# Altium schematic symbol library TitansLib.SchLib: 462 symbols (part 14 of 24)
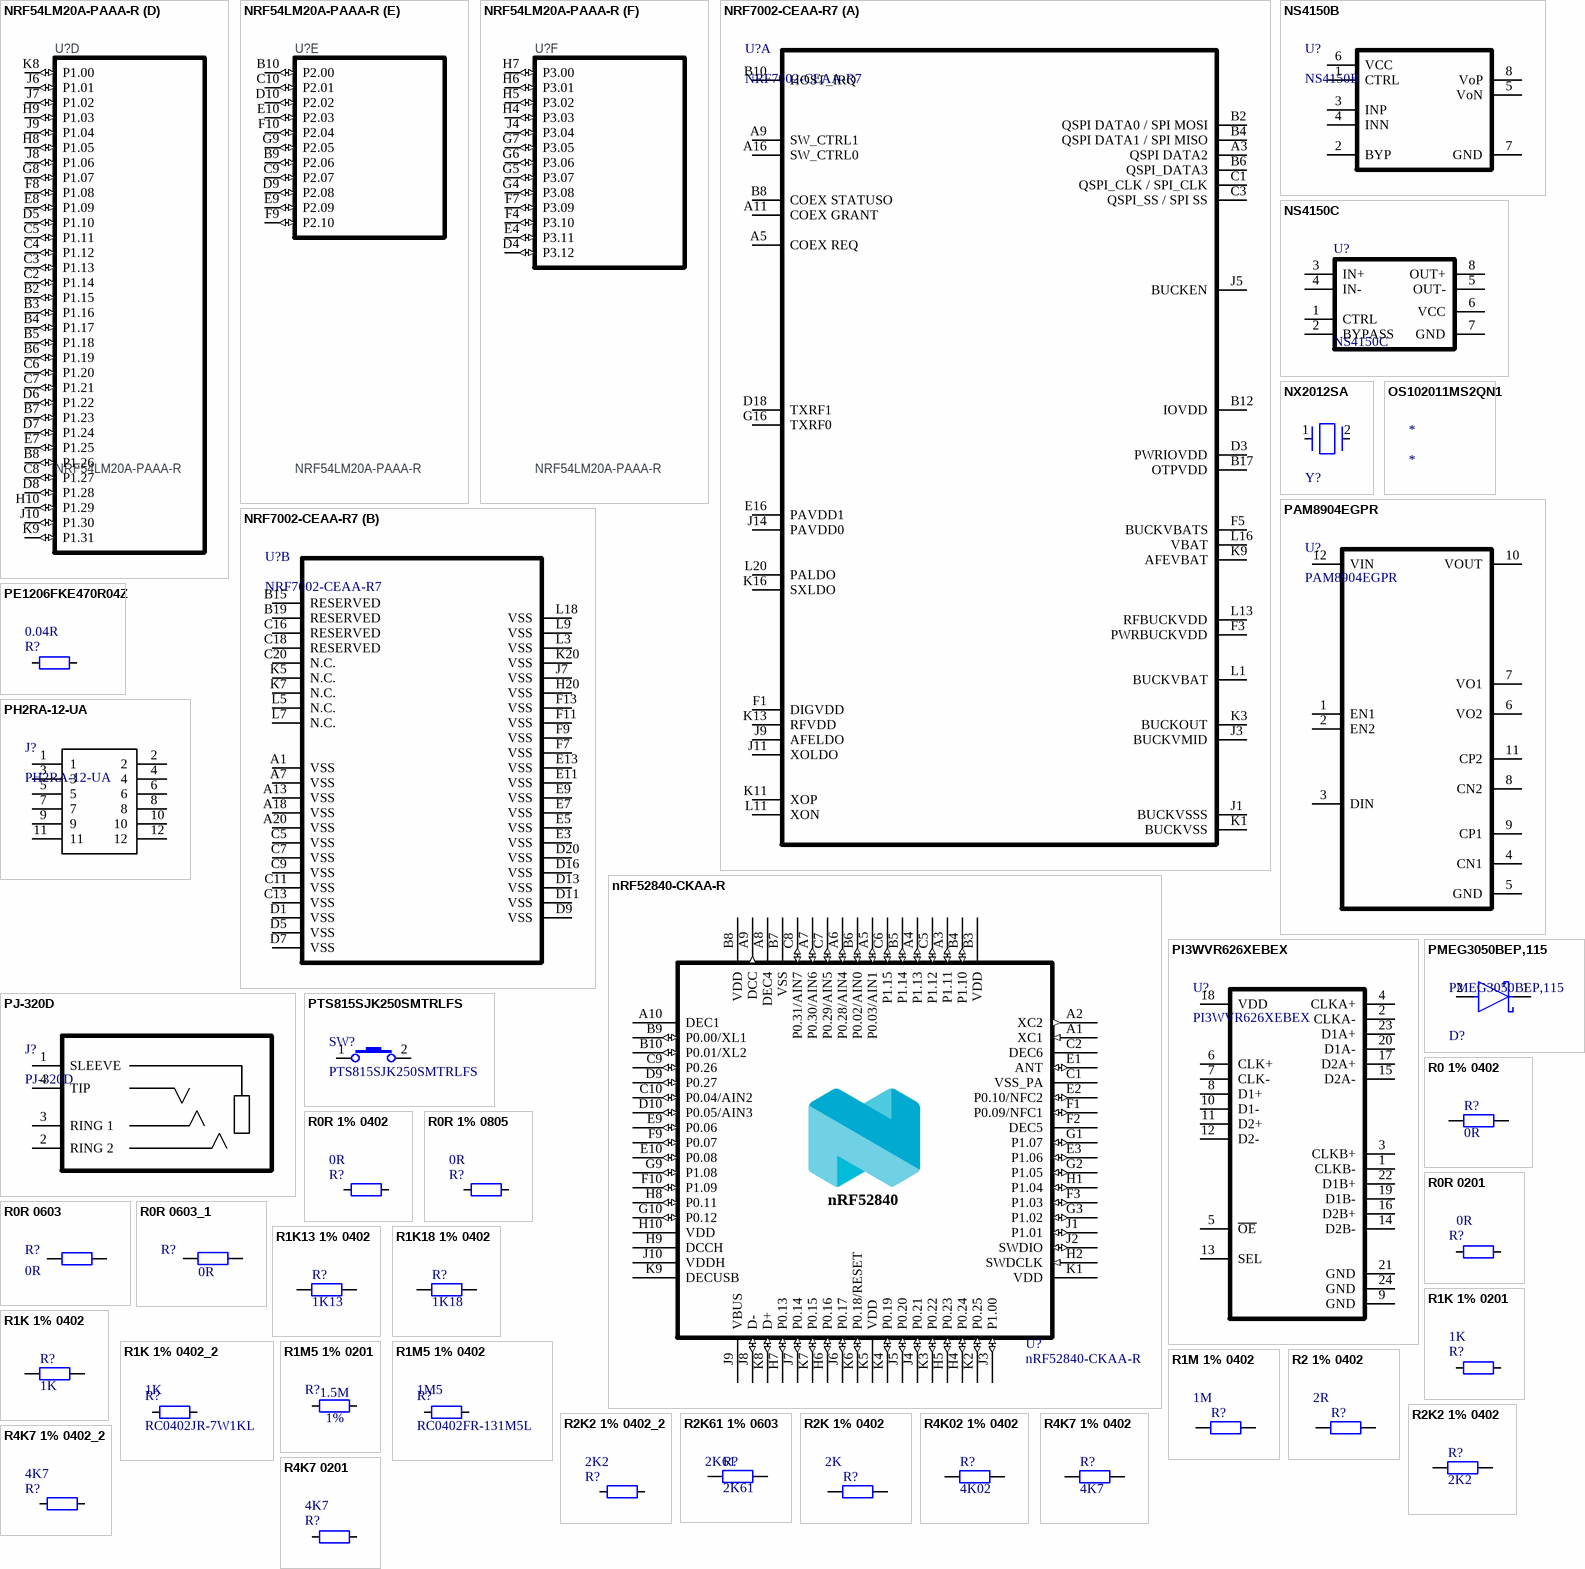
[diagram p30: symbols NRF54LM20A-PAAA-R to R4K7 0201]

## PH2RA-12-UA
designator J?
Connector; Manufacturer_Name: Adam Tech; Datasheet Link: https://app.adam-tech.com/products/download/data_sheet/200508/ph2ra-xx-ua-data-sheet.pdf; Height: 5.3848mm; Manufacturer Part Number: PH2RA-12-UA; Mouser Part Number: 737-PH2RA-12-UA; Mouser Price/Stock: https://www.mouser.co.uk/ProductDetail/Adam-Tech/PH2RA-12-UA?qs=HoCaDK9Nz5deHcBV3KpFqA%3D%3D; Arrow Part Number: PH2RA-12-UA; Arrow Price/Stock: https://www.arrow.com/en/products/ph2ra-12-ua/adam-tech?region=nac; Supplier 1: DigiKey; Supplier Part Number 1: 2057-PH2RA-12-UA-ND; Supplier 2: Mouser; Supplier Part Number 2: 737-PH2RA-12-UA
footprint PH2RA12UA
pins: 1, 2, 3, 4, 5, 6, 7, 8, 9, 10, 11, 12

## PI3WVR626XEBEX
designator U?
Two-data-lane MIPI switch.; Manufacturer: Diodes; Supplier: Future Electronics; Supplier Part Number: 9202612; Manufacturer Part Number: PI3WVR626XEBEX; RoHS: No; Category: Integrated Circuits (ICs); Stock: 3000; Pricing: 1=0.895, 15=0.795, 100=0.725, 400=0.675, 2000=0.615 (USD); RoHS Compliant: Yes; Supplier 1: Digikey; Supplier Part Number 1: 31-PI3WVR626XEBEXDKR-ND; Supplier 2: Mouser; Supplier Part Number 2: 621-PI3WVR626XEBEX
pins: 1 CLKB-, 2 CLKA-, 3 CLKB+, 4 CLKA+, 5 ~{OE}, 6 CLK+, 7 CLK-, 8 D1+, 9 GND, 10 D1-, 11 D2+, 12 D2-, 13 SEL, 14 D2B-, 15 D2A-, 16 D2B+, 17 D2A+, 18 VDD, 19 D1B-, 20 D1A-, 21 GND, 22 D1B+, 23 D1A+, 24 GND

## PJ-320D
designator J?
3.5mm Headphone Jack 500mA 30V Surface Mount; Manufacturer 1: HanElectricity; Datasheet Link: https://www.lcsc.com/datasheet/C22459515.pdf?spm=wm.sxq.inf.ggs___wm.fly.bg.0.xh&lcsc_vid=TwJcA1RTQVcIX1UDQQNYAlNXT1FbVQIAQ1cKAlUFFFkxVlNeQ1RWU1NWR1NZXjsOAxUeFF5JWBYZEEoKFBINSQcJGk4%3D; Height: 5.75mm; Manufacturer Part Number 1: PJ-320D; Supplier 1: LCSC; Supplier Part Number 1: C22459515; Supplier Unit Price 1: 0.029
footprint PJ320D_HANS_Smaller pads
pins: 1 SLEEVE, 2 RING 2, 3 RING 1, 4 TIP

## PMEG3050BEP,115
designator D?
Rectifier Diode Schottky 30V 5A Automotive 2-Pin SOD-128 T/R / DIODE SCHOTTKY 30V 5A SOD128; Manufacturer: Nexperia; Manufacturer Lifecycle Status: RELEASED FOR SUPPLY; Value: 800pF; Element Configuration: Single; Forward Voltage: 450mV; Max Forward Surge Current (Ifsm): 70A; Max Junction Temperature (Tj): 150°C; Max Power Dissipation: 625mW; Max Reverse Leakage Current: 250µA; Number of Elements: 1; RoHS Compliant: Yes; Supplier: Newark; Supplier Part Number: PMEG3050BEP,115; Manufacturer Part Number: PMEG3050BEP,115; RoHS: Compliant; Category: Schottky Diodes; Stock: 19889; Pricing: 5=1,4, 10=0,876, 25=0,772, 50=0,669, 100=0,566, 250=0,499, 500=0,432, 1000=0,389 (USD); Ambient Temperature Range High: 150°C; Average Rectified Current: 5A; China RoHS: Non-Compliant; Contact Plating: Tin; Forward Current: 5A; Height: 1.1mm; Lead Free: Lead Free; Lifecycle Status: Production; Max Operating Temperature: 150°C; Max Output current: 5A; Max Repetitive Reverse Voltage (Vrrm): 30V; Max Reverse Voltage (DC): 30V; Max Surge Current: 70A; Min Operating Temperature: -55°C; Mounting Technology: Surface Mount; Pins: 2; Number of Terminals: 2; Peak Non-Repetitive Surge Current: 70A; Peak Reverse Current: 250µA; Radiation Hardening: No; Ratings: AEC-Q101; REACH SVHC: No; Reverse Standoff Voltage: 30V; Reverse Voltage: 30V; Schedule B: 8541100050, 8541100050|8541100050|8541100050|8541100050|8541100050, 8541100080; ComponentLink1URL: https://datasheet.octopart.com:443/PMEG3050BEP%2C115-Nexperia-datasheet-87581997.pdf?src-supplier=Upverter; ComponentLink1Description: https://datasheet.octopart.com:443/PMEG3050BEP%2C115-Nexperia-datasheet-87581997.pdf?src-supplier=Upverter; ComponentLink2URL: https://datasheet.octopart.com:443/PMEG3050BEP%2C115-Nexperia-datasheet-8823949.pdf?src-supplier=element14+APAC; ComponentLink2Description: https://datasheet.octopart.com:443/PMEG3050BEP%2C115-Nexperia-datasheet-8823949.pdf?src-supplier=element14+APAC; ComponentLink3URL: https://datasheet.octopart.com:443/PMEG3050BEP%2C115-Nexperia-datasheet-180924785.pdf?src-supplier=Farnell; ComponentLink3Description: https://datasheet.octopart.com:443/PMEG3050BEP%2C115-Nexperia-datasheet-180924785.pdf?src-supplier=Farnell; ComponentLink4URL: https://datasheet.octopart.com:443/PMEG3050BEP%2C115-Nexperia-datasheet-177198915.pdf?src-supplier=Burklin+Elektronik; ComponentLink4Description: https://datasheet.octopart.com:443/PMEG3050BEP%2C115-Nexperia-datasheet-177198915.pdf?src-supplier=Burklin+Elektronik; ComponentLink5URL: https://datasheet.octopart.com:443/PMEG3050BEP%2C115-Nexperia-datasheet-182428595.pdf?src-supplier=Newark; ComponentLink5Description: https://datasheet.octopart.com:443/PMEG3050BEP%2C115-Nexperia-datasheet-182428595.pdf?src-supplier=Newark; ComponentLink6URL: https://datasheet.octopart.com:443/PMEG3050BEP%2C115-Nexperia-datasheet-103775416.pdf?src-supplier=TME; ComponentLink6Description: https://datasheet.octopart.com:443/PMEG3050BEP%2C115-Nexperia-datasheet-103775416.pdf?src-supplier=TME; ComponentLink7URL: http://sigma.octopart.com:80/reach_statement/NXP-Semiconductors-company-13.pdf?src-supplier=Compliance+Statements; ComponentLink7Description: http://sigma.octopart.com:80/reach_statement/NXP-Semiconductors-company-13.pdf?src-supplier=Compliance+Statements; ComponentLink8URL: http://sigma.octopart.com:80/rohs_statement/NXP-Semiconductors-company-12.pdf?src-supplier=Compliance+Statements; ComponentLink8Description: http://sigma.octopart.com:80/rohs_statement/NXP-Semiconductors-company-12.pdf?src-supplier=Compliance+Statements; Supplier 1: DigiKey; Supplier Part Number 1: 1727-5207-1-ND; Supplier 2: DigiKey; Supplier Part Number 2: 1727-5207-6-ND; Supplier 3: Mouser; Supplier Part Number 3: 771-PMEG3050BEP-115; Supplier 4: LCSC; Supplier Part Number 4: C456148
footprint FP-SOD128-MFG
pins: 1 C, 2 A

## PTS815SJK250SMTRLFS
designator SW?
Keypad Switch, 1 Switches, SPST, Momentary-tactile, 0.05A, 12VDC, 2.94N, Solder Terminal, Surface Mount-straight; Manufacturer: ITT C&K; Supplier: Digikey; Supplier Part Number: CKN12216-1-ND; Manufacturer Part Number: PTS815SJK250SMTRLFS; RoHS: Yes; Category: Tactile Switches; Stock: 10292; Pricing: 1=0.22, 10=0.191, 25=0.1788, 100=0.1606, 250=0.14892, 500=0.14052, 1000=0.13263 (USD); ComponentLink1URL: http://datasheet.octopart.com/PTS815SJK250SMTRLFS-C%26K-Components-datasheet-130077068.pdf?src-supplier=Avnet; ComponentLink1Description: http://datasheet.octopart.com/PTS815SJK250SMTRLFS-C%26K-Components-datasheet-130077068.pdf?src-supplier=Avnet; ComponentLink2URL: http://datasheet.octopart.com/PTS815SJK250SMTRLFS-C%26K-Components-datasheet-130077068.pdf?src-supplier=Digikey; ComponentLink2Description: http://datasheet.octopart.com/PTS815SJK250SMTRLFS-C%26K-Components-datasheet-130077068.pdf?src-supplier=Digikey; ComponentLink3URL: http://datasheet.octopart.com/PTS815SJK250SMTRLFS-C%26K-Components-datasheet-130077068.pdf?src-supplier=Allied+Electronics; ComponentLink3Description: http://datasheet.octopart.com/PTS815SJK250SMTRLFS-C%26K-Components-datasheet-130077068.pdf?src-supplier=Allied+Electronics; ComponentLink4URL: http://datasheet.octopart.com/PTS815SJK250SMTRLFS-C%26K-Components-datasheet-130077068.pdf?src-supplier=Newark; ComponentLink4Description: http://datasheet.octopart.com/PTS815SJK250SMTRLFS-C%26K-Components-datasheet-130077068.pdf?src-supplier=Newark; ComponentLink5URL: http://datasheet.octopart.com/PTS815SJK250SMTRLFS-C%26K-Components-datasheet-130077068.pdf?src-supplier=Onlinecomponents.com; ComponentLink5Description: http://datasheet.octopart.com/PTS815SJK250SMTRLFS-C%26K-Components-datasheet-130077068.pdf?src-supplier=Onlinecomponents.com; ComponentLink6URL: http://datasheet.octopart.com/PTS815SJK250SMTRLFS-C%26K-Components-datasheet-130077068.pdf?src-supplier=Mouser; ComponentLink6Description: http://datasheet.octopart.com/PTS815SJK250SMTRLFS-C%26K-Components-datasheet-130077068.pdf?src-supplier=Mouser; ComponentLink7URL: http://datasheet.octopart.com/PTS815SJK250SMTRLFS-C%26K-Components-datasheet-130077068.pdf?src-supplier=Future+Electronics; ComponentLink7Description: http://datasheet.octopart.com/PTS815SJK250SMTRLFS-C%26K-Components-datasheet-130077068.pdf?src-supplier=Future+Electronics; ComponentLink8URL: http://datasheet.octopart.com/PTS815SJK250SMTRLFS-C%26K-Components-datasheet-130077068.pdf?src-supplier=Verical; ComponentLink8Description: http://datasheet.octopart.com/PTS815SJK250SMTRLFS-C%26K-Components-datasheet-130077068.pdf?src-supplier=Verical; ComponentLink9URL: http://datasheet.octopart.com/PTS815SJK250SMTRLFS-C%26K-Components-datasheet-130077068.pdf?src-supplier=Electro+Sonic; ComponentLink9Description: http://datasheet.octopart.com/PTS815SJK250SMTRLFS-C%26K-Components-datasheet-130077068.pdf?src-supplier=Electro+Sonic; ComponentLink10URL: https://datasheet.octopart.com/PTS815SJK250SMTRLFS-C%26K-Components-datasheet-166147782.pdf?src-supplier=TME; ComponentLink10Description: https://datasheet.octopart.com/PTS815SJK250SMTRLFS-C%26K-Components-datasheet-166147782.pdf?src-supplier=TME; ComponentLink11URL: http://datasheet.octopart.com/PTS815SJK250SMTRLFS-C%26K-Components-datasheet-130077068.pdf?src-supplier=LCSC; ComponentLink11Description: http://datasheet.octopart.com/PTS815SJK250SMTRLFS-C%26K-Components-datasheet-130077068.pdf?src-supplier=LCSC; ComponentLink12URL: http://datasheet.octopart.com/PTS815SJK250SMTRLFS-C%26K-Components-datasheet-130077068.pdf?src-supplier=TTI; ComponentLink12Description: http://datasheet.octopart.com/PTS815SJK250SMTRLFS-C%26K-Components-datasheet-130077068.pdf?src-supplier=TTI; ComponentLink13URL: http://datasheet.octopart.com/PTS815SJK250SMTRLFS-C%26K-Components-datasheet-130077068.pdf?src-supplier=Sager+Electronics; ComponentLink13Description: http://datasheet.octopart.com/PTS815SJK250SMTRLFS-C%26K-Components-datasheet-130077068.pdf?src-supplier=Sager+Electronics; ComponentLink14URL: http://datasheet.octopart.com/PTS815SJK250SMTRLFS-C%26K-Components-datasheet-130077068.pdf?src-supplier=NAC+Semi; ComponentLink14Description: http://datasheet.octopart.com/PTS815SJK250SMTRLFS-C%26K-Components-datasheet-130077068.pdf?src-supplier=NAC+Semi
pins: 1, 2

## R0 1% 0402
designator R?, comment value 0R  (hidden comment: RC0402FR-070RL)
0R 1% 0402 1/16W; Manufacturer: Yageo; Package: 0402; Manufacturer Part Number: RC0402FR-070RL; Type: Resistor; Power: 1/16W; Supplier 1: Mouser; Supplier Part Number 1: 603-RC0402FR-070RL; Tolerance: 1%
footprint R0402_H0P4
pins: 1, 2

## R0R 1% 0402
designator R?, comment value 0R  (hidden comment: RC0402FR-070RL)
GENERAL PURPOSE CHIP RESISTOR Metal Glaze/thick Film, 0.0625W, 0ohm, Surface Mount, 0402; Manufacturer: Yageo Group; Power Dissipation: 62.5mW; Power Rating: 63mW; Tolerance: 1%; Voltage Rating: 50V; Supplier: DigiKey; Supplier Part Number: 311-0.0LRCT-ND; Manufacturer Part Number: RC0402FR-070RL; RoHS: Compliant; Category: Chip SMD Resistors; Stock: 2431195; Pricing: 1=0.1, 10=0.010, 25=0.0064, 50=0.0054, 100=0.0047, 250=0.00392, 500=0.00346, 1000=0.00304, 5000=0.0023 (USD); Case/Package: 0402; Case Code (Imperial): 0402; Case Code (Metric): 1005; China RoHS: Non-Compliant; Composition: Thick Film; Contact Plating: Tin; Height: 350µm; Lead Free: Lead Free; Length: 1mm; Lifecycle Status: Production; Max Operating Temperature: 155°C; Min Operating Temperature: -55°C; Mounting Technology: Surface Mount; Number of Terminals: 2; Packaging: Tape & Reel; Radiation Hardening: No; REACH SVHC: Yes; Termination: SMD/SMT; Width: 500µm; ComponentLink1URL: https://datasheet.octopart.com:443/RC0402FR-070RL-Yageo-datasheet-141265859.pdf?src-supplier=Upverter; ComponentLink1Description: https://datasheet.octopart.com:443/RC0402FR-070RL-Yageo-datasheet-141265859.pdf?src-supplier=Upverter; ComponentLink2URL: https://sigma.octopart.com:443/138820526/technical_drawing/Yageo-RC0402FR-070RL.pdf?src-supplier=Upverter; ComponentLink2Description: https://sigma.octopart.com:443/138820526/technical_drawing/Yageo-RC0402FR-070RL.pdf?src-supplier=Upverter; ComponentLink3URL: https://datasheet.octopart.com:443/RC0402FR-070RL-Yageo-datasheet-12531192.pdf?src-supplier=IHS; ComponentLink3Description: https://datasheet.octopart.com:443/RC0402FR-070RL-Yageo-datasheet-12531192.pdf?src-supplier=IHS; ComponentLink4URL: https://datasheet.octopart.com:443/RC0402FR-070RL-Yageo-datasheet-164759695.pdf?src-supplier=Future+Electronics; ComponentLink4Description: https://datasheet.octopart.com:443/RC0402FR-070RL-Yageo-datasheet-164759695.pdf?src-supplier=Future+Electronics; ComponentLink5URL: https://datasheet.octopart.com:443/RC0402FR-070RL-Yageo-datasheet-137700087.pdf?src-supplier=Future+Electronics; ComponentLink5Description: https://datasheet.octopart.com:443/RC0402FR-070RL-Yageo-datasheet-137700087.pdf?src-supplier=Future+Electronics; ComponentLink6URL: https://datasheet.octopart.com:443/RC0402FR-070RL-Yageo-datasheet-10408619.pdf?src-supplier=Future+Electronics; ComponentLink6Description: https://datasheet.octopart.com:443/RC0402FR-070RL-Yageo-datasheet-10408619.pdf?src-supplier=Future+Electronics; ComponentLink7URL: https://datasheet.octopart.com:443/RC0402FR-070RL-Yageo-datasheet-8324527.pdf?src-supplier=Future+Electronics; ComponentLink7Description: https://datasheet.octopart.com:443/RC0402FR-070RL-Yageo-datasheet-8324527.pdf?src-supplier=Future+Electronics; ComponentLink8URL: https://datasheet.octopart.com:443/RC0402FR-070RL-Yageo-datasheet-79472498.pdf?src-supplier=Megastar; ComponentLink8Description: https://datasheet.octopart.com:443/RC0402FR-070RL-Yageo-datasheet-79472498.pdf?src-supplier=Megastar; ComponentLink9URL: https://datasheet.octopart.com/RC0402FR-070RL-Yageo-datasheet-73766026.pdf; ComponentLink9Description: https://datasheet.octopart.com/RC0402FR-070RL-Yageo-datasheet-73766026.pdf; ComponentLink10URL: http://sigma.octopart.com:80/conflict_mineral_statement/Yageo-company-3.pdf?src-supplier=Compliance+Statements; ComponentLink10Description: http://sigma.octopart.com:80/conflict_mineral_statement/Yageo-company-3.pdf?src-supplier=Compliance+Statements; ComponentLink11URL: http://sigma.octopart.com:80/rohs_statement/Yageo-company-2.pdf?src-supplier=Compliance+Statements; ComponentLink11Description: http://sigma.octopart.com:80/rohs_statement/Yageo-company-2.pdf?src-supplier=Compliance+Statements
footprint RES0402-M (Chip Resistor, 2-Leads, Body 1.00x0.50mm, IPC Medium Density)
pins: 1, 2

## R0R 1% 0805
designator R?, comment value 0R  (hidden comment: RC0805JR-070RL)
GENERAL PURPOSE CHIP RESISTOR Metal Glaze/thick Film, 0.125W, 0ohm, Surface Mount, 0805; Manufacturer: Yageo Group; Power Dissipation: 125mW; Temperature Coefficient: 300ppm/°C; Tolerance: 5%; Voltage Rating: 150V; Supplier: DigiKey; Supplier Part Number: 311-0.0ARCT-ND; Manufacturer Part Number: RC0805JR-070RL; RoHS: Compliant; Category: Chip SMD Resistors; Stock: 1513138; Pricing: 1=0.1, 10=0.015, 25=0.0128, 50=0.011, 100=0.0097, 250=0.00812, 500=0.00716, 1000=0.00633 (USD); Case/Package: 0805; Case Code (Imperial): 0805; China RoHS: Non-Compliant; Composition: Thick Film; Contact Plating: Tin; Depth: 1.25mm; Height: 500µm; Lead Free: Lead Free; Length: 2mm; Lifecycle Status: Production; Max Operating Temperature: 155°C; Military Standard: Not; Min Operating Temperature: -55°C; Mounting Technology: Surface Mount; Pins: 2; Number of Terminals: 2; Packaging: Tape & Reel; Power Rating: 125mW; Radiation Hardening: No; REACH SVHC: Yes; Schedule B: 8533290000, 8533290000|8533290000, 8533290000|8533290000|8533290000, 8533290000|8533290000|8533290000|8533290000; Termination: SMD/SMT; Voltage Rating (DC): 150V; Width: 1.25mm; ComponentLink1URL: https://datasheet.octopart.com:443/RC0805JR-070RL-Yageo-datasheet-182189538.pdf?src-supplier=IHS; ComponentLink1Description: https://datasheet.octopart.com:443/RC0805JR-070RL-Yageo-datasheet-182189538.pdf?src-supplier=IHS; ComponentLink2URL: https://datasheet.octopart.com:443/RC0805JR-070RL-Yageo-datasheet-103092701.pdf?src-supplier=Upverter; ComponentLink2Description: https://datasheet.octopart.com:443/RC0805JR-070RL-Yageo-datasheet-103092701.pdf?src-supplier=Upverter; ComponentLink3URL: https://datasheet.octopart.com:443/RC0805JR-070RL-Yageo-datasheet-98239111.pdf?src-supplier=Upverter; ComponentLink3Description: https://datasheet.octopart.com:443/RC0805JR-070RL-Yageo-datasheet-98239111.pdf?src-supplier=Upverter; ComponentLink4URL: https://datasheet.octopart.com:443/RC0805JR-070RL-Yageo-datasheet-8330313.pdf?src-supplier=Newark; ComponentLink4Description: https://datasheet.octopart.com:443/RC0805JR-070RL-Yageo-datasheet-8330313.pdf?src-supplier=Newark; ComponentLink5URL: https://datasheet.octopart.com:443/RC0805JR-070RL-Yageo-datasheet-8327506.pdf?src-supplier=Newark; ComponentLink5Description: https://datasheet.octopart.com:443/RC0805JR-070RL-Yageo-datasheet-8327506.pdf?src-supplier=Newark; ComponentLink6URL: https://datasheet.octopart.com:443/RC0805JR-070RL-Yageo-datasheet-62067350.pdf?src-supplier=element14+APAC; ComponentLink6Description: https://datasheet.octopart.com:443/RC0805JR-070RL-Yageo-datasheet-62067350.pdf?src-supplier=element14+APAC; ComponentLink7URL: https://datasheet.octopart.com:443/RC0805JR-070RL-Yageo-datasheet-17879891.pdf?src-supplier=element14+APAC; ComponentLink7Description: https://datasheet.octopart.com:443/RC0805JR-070RL-Yageo-datasheet-17879891.pdf?src-supplier=element14+APAC; ComponentLink8URL: https://datasheet.octopart.com:443/RC0805JR-070RL-Yageo-Group-datasheet-176638170.pdf?src-supplier=Future+Electronics; ComponentLink8Description: https://datasheet.octopart.com:443/RC0805JR-070RL-Yageo-Group-datasheet-176638170.pdf?src-supplier=Future+Electronics; ComponentLink9URL: https://datasheet.octopart.com:443/RC0805JR-070RL-Yageo-datasheet-164759695.pdf?src-supplier=Future+Electronics; ComponentLink9Description: https://datasheet.octopart.com:443/RC0805JR-070RL-Yageo-datasheet-164759695.pdf?src-supplier=Future+Electronics; ComponentLink10URL: https://datasheet.octopart.com:443/RC0805JR-070RL-Yageo-datasheet-15800360.pdf?src-supplier=Future+Electronics; ComponentLink10Description: https://datasheet.octopart.com:443/RC0805JR-070RL-Yageo-datasheet-15800360.pdf?src-supplier=Future+Electronics; ComponentLink11URL: https://datasheet.octopart.com:443/RC0805JR-070RL-Yageo-datasheet-12592811.pdf?src-supplier=Future+Electronics; ComponentLink11Description: https://datasheet.octopart.com:443/RC0805JR-070RL-Yageo-datasheet-12592811.pdf?src-supplier=Future+Electronics; ComponentLink12URL: https://datasheet.octopart.com:443/RC0805JR-070RL-Yageo-datasheet-8324252.pdf?src-supplier=Future+Electronics; ComponentLink12Description: https://datasheet.octopart.com:443/RC0805JR-070RL-Yageo-datasheet-8324252.pdf?src-supplier=Future+Electronics; ComponentLink13URL: https://datasheet.octopart.com:443/RC0805JR-070RL-Yageo-datasheet-79472498.pdf?src-supplier=Megastar; ComponentLink13Description: https://datasheet.octopart.com:443/RC0805JR-070RL-Yageo-datasheet-79472498.pdf?src-supplier=Megastar; ComponentLink14URL: https://datasheet.octopart.com/RC0805JR-070RL-Yageo-datasheet-73766026.pdf; ComponentLink14Description: https://datasheet.octopart.com/RC0805JR-070RL-Yageo-datasheet-73766026.pdf; ComponentLink15URL: https://datasheet.octopart.com:443/RC0805JR-070RL-Yageo-datasheet-8377918.pdf?src-supplier=Farnell; ComponentLink15Description: https://datasheet.octopart.com:443/RC0805JR-070RL-Yageo-datasheet-8377918.pdf?src-supplier=Farnell; ComponentLink16URL: https://datasheet.octopart.com:443/RC0805JR-070RL-Yageo-datasheet-118657.pdf?src-supplier=DigiKey; ComponentLink16Description: https://datasheet.octopart.com:443/RC0805JR-070RL-Yageo-datasheet-118657.pdf?src-supplier=DigiKey; ComponentLink17URL: http://sigma.octopart.com:80/conflict_mineral_statement/Yageo-company-3.pdf?src-supplier=Compliance+Statements; ComponentLink17Description: http://sigma.octopart.com:80/conflict_mineral_statement/Yageo-company-3.pdf?src-supplier=Compliance+Statements; ComponentLink18URL: http://sigma.octopart.com:80/rohs_statement/Yageo-company-2.pdf?src-supplier=Compliance+Statements; ComponentLink18Description: http://sigma.octopart.com:80/rohs_statement/Yageo-company-2.pdf?src-supplier=Compliance+Statements; Supplier 1: DigiKey; Supplier Part Number 1: 311-0.0ARCT-ND; Supplier 2: DigiKey; Supplier Part Number 2: 311-0.0ARTR-ND; Supplier 3: Mouser; Supplier Part Number 3: 603-RC0805JR-070RL
footprint RES0402-M (Chip Resistor, 2-Leads, Body 1.00x0.50mm, IPC Medium Density)
pins: 1, 2

## R0R 0201
designator R?, comment value 0R  (hidden comment: RC0201JR-070RL)
GENERAL PURPOSE CHIP RESISTOR Metal Glaze/thick Film, 0.05W, 0ohm, Surface Mount, 0201; Manufacturer: Yageo Group; Max Power Dissipation: 50mW; Temperature Coefficient: 200ppm/°C; Tolerance: 5%; Voltage Rating: 25V; Supplier: DigiKey; Supplier Part Number: 311-0.0NCT-ND; Manufacturer Part Number: RC0201JR-070RL; RoHS: Compliant; Category: Chip SMD Resistors; Stock: 1036310; Pricing: 1=0.1, 10=0.019, 25=0.0156, 50=0.0138, 100=0.012, 250=0.01008, 500=0.0089, 1000=0.0079, 5000=0.00609 (USD); Case/Package: 0201; Case Code (Imperial): 0201; Case Code (Metric): 0603; China RoHS: Non-Compliant; Composition: Thick Film; Contact Plating: Tin; Depth: 300µm; Features: Moisture Resistant; Height: 230µm; Lead Free: Lead Free; Length: 600µm; Lifecycle Status: Production; Max Operating Temperature: 125°C; Military Standard: Not; Min Operating Temperature: -55°C; Mounting Technology: Surface Mount; Pins: 2; Number of Terminals: 2; Number of Terminations: 2; Packaging: Tape & Reel; Power Dissipation: 50mW; Power Rating: 50mW; Radiation Hardening: No; REACH SVHC: Yes; Termination: SMD/SMT; Voltage Rating (DC): 25V; Weight: 170.097139µg; Width: 300µm; ComponentLink1URL: https://datasheet.octopart.com:443/RC0201JR-070RL-Yageo-datasheet-182189538.pdf?src-supplier=IHS; ComponentLink1Description: https://datasheet.octopart.com:443/RC0201JR-070RL-Yageo-datasheet-182189538.pdf?src-supplier=IHS; ComponentLink2URL: https://datasheet.octopart.com:443/RC0201JR-070RL-Yageo-datasheet-127823281.pdf?src-supplier=Upverter; ComponentLink2Description: https://datasheet.octopart.com:443/RC0201JR-070RL-Yageo-datasheet-127823281.pdf?src-supplier=Upverter; ComponentLink3URL: https://datasheet.octopart.com:443/RC0201JR-070RL-Yageo-Group-datasheet-190305687.pdf?src-supplier=Newark; ComponentLink3Description: https://datasheet.octopart.com:443/RC0201JR-070RL-Yageo-Group-datasheet-190305687.pdf?src-supplier=Newark; ComponentLink4URL: https://datasheet.octopart.com:443/RC0201JR-070RL-Yageo-datasheet-8325180.pdf?src-supplier=Newark; ComponentLink4Description: https://datasheet.octopart.com:443/RC0201JR-070RL-Yageo-datasheet-8325180.pdf?src-supplier=Newark; ComponentLink5URL: https://datasheet.octopart.com:443/RC0201JR-070RL-Yageo-datasheet-12509713.pdf?src-supplier=element14+APAC; ComponentLink5Description: https://datasheet.octopart.com:443/RC0201JR-070RL-Yageo-datasheet-12509713.pdf?src-supplier=element14+APAC; ComponentLink6URL: https://datasheet.octopart.com:443/RC0201JR-070RL-Yageo-datasheet-62067350.pdf?src-supplier=element14+APAC; ComponentLink6Description: https://datasheet.octopart.com:443/RC0201JR-070RL-Yageo-datasheet-62067350.pdf?src-supplier=element14+APAC; ComponentLink7URL: https://datasheet.octopart.com:443/RC0201JR-070RL-Yageo-datasheet-10911895.pdf?src-supplier=element14+APAC; ComponentLink7Description: https://datasheet.octopart.com:443/RC0201JR-070RL-Yageo-datasheet-10911895.pdf?src-supplier=element14+APAC; ComponentLink8URL: https://datasheet.octopart.com:443/RC0201JR-070RL-Yageo-Group-datasheet-176638170.pdf?src-supplier=Future+Electronics; ComponentLink8Description: https://datasheet.octopart.com:443/RC0201JR-070RL-Yageo-Group-datasheet-176638170.pdf?src-supplier=Future+Electronics; ComponentLink9URL: https://datasheet.octopart.com:443/RC0201JR-070RL-Yageo-datasheet-164759695.pdf?src-supplier=Future+Electronics; ComponentLink9Description: https://datasheet.octopart.com:443/RC0201JR-070RL-Yageo-datasheet-164759695.pdf?src-supplier=Future+Electronics; ComponentLink10URL: https://datasheet.octopart.com:443/RC0201JR-070RL-Yageo-datasheet-137700087.pdf?src-supplier=Future+Electronics; ComponentLink10Description: https://datasheet.octopart.com:443/RC0201JR-070RL-Yageo-datasheet-137700087.pdf?src-supplier=Future+Electronics; ComponentLink11URL: https://datasheet.octopart.com:443/RC0201JR-070RL-Yageo-datasheet-103092701.pdf?src-supplier=Future+Electronics; ComponentLink11Description: https://datasheet.octopart.com:443/RC0201JR-070RL-Yageo-datasheet-103092701.pdf?src-supplier=Future+Electronics; ComponentLink12URL: https://datasheet.octopart.com:443/RC0201JR-070RL-Yageo-datasheet-98239111.pdf?src-supplier=Future+Electronics; ComponentLink12Description: https://datasheet.octopart.com:443/RC0201JR-070RL-Yageo-datasheet-98239111.pdf?src-supplier=Future+Electronics; ComponentLink13URL: https://datasheet.octopart.com:443/RC0201JR-070RL-Yageo-datasheet-44382975.pdf?src-supplier=Future+Electronics; ComponentLink13Description: https://datasheet.octopart.com:443/RC0201JR-070RL-Yageo-datasheet-44382975.pdf?src-supplier=Future+Electronics; ComponentLink14URL: https://datasheet.octopart.com:443/RC0201JR-070RL-Yageo-datasheet-41589693.pdf?src-supplier=Future+Electronics; ComponentLink14Description: https://datasheet.octopart.com:443/RC0201JR-070RL-Yageo-datasheet-41589693.pdf?src-supplier=Future+Electronics; ComponentLink15URL: https://datasheet.octopart.com:443/RC0201JR-070RL-Yageo-datasheet-37140709.pdf?src-supplier=Future+Electronics; ComponentLink15Description: https://datasheet.octopart.com:443/RC0201JR-070RL-Yageo-datasheet-37140709.pdf?src-supplier=Future+Electronics; ComponentLink16URL: https://datasheet.octopart.com:443/RC0201JR-070RL-Yageo-datasheet-12590898.pdf?src-supplier=Future+Electronics; ComponentLink16Description: https://datasheet.octopart.com:443/RC0201JR-070RL-Yageo-datasheet-12590898.pdf?src-supplier=Future+Electronics; ComponentLink17URL: https://datasheet.octopart.com:443/RC0201JR-070RL-Yageo-datasheet-5319114.pdf?src-supplier=Future+Electronics; ComponentLink17Description: https://datasheet.octopart.com:443/RC0201JR-070RL-Yageo-datasheet-5319114.pdf?src-supplier=Future+Electronics; ComponentLink18URL: https://datasheet.octopart.com:443/RC0201JR-070RL-Yageo-datasheet-12535854.pdf?src-supplier=Future+Electronics; ComponentLink18Description: https://datasheet.octopart.com:443/RC0201JR-070RL-Yageo-datasheet-12535854.pdf?src-supplier=Future+Electronics; ComponentLink19URL: https://datasheet.octopart.com:443/RC0201JR-070RL-Yageo-datasheet-148775077.pdf?src-supplier=TME; ComponentLink19Description: https://datasheet.octopart.com:443/RC0201JR-070RL-Yageo-datasheet-148775077.pdf?src-supplier=TME; ComponentLink20URL: https://datasheet.octopart.com/RC0201JR-070RL-Yageo-datasheet-73766026.pdf; ComponentLink20Description: https://datasheet.octopart.com/RC0201JR-070RL-Yageo-datasheet-73766026.pdf; ComponentLink21URL: https://datasheet.octopart.com:443/RC0201JR-070RL-Yageo-datasheet-8701561.pdf?src-supplier=element14; ComponentLink21Description: https://datasheet.octopart.com:443/RC0201JR-070RL-Yageo-datasheet-8701561.pdf?src-supplier=element14; ComponentLink22URL: http://sigma.octopart.com:80/conflict_mineral_statement/Yageo-company-3.pdf?src-supplier=Compliance+Statements; ComponentLink22Description: http://sigma.octopart.com:80/conflict_mineral_statement/Yageo-company-3.pdf?src-supplier=Compliance+Statements; ComponentLink23URL: http://sigma.octopart.com:80/rohs_statement/Yageo-company-2.pdf?src-supplier=Compliance+Statements; ComponentLink23Description: http://sigma.octopart.com:80/rohs_statement/Yageo-company-2.pdf?src-supplier=Compliance+Statements
footprint RESC0603X03N (Chip Resistor, 2-Leads, Body 0.60x0.30mm, IPC Medium Density)
pins: 1, 2

## R0R 0603
designator R?, comment 0R
0R 0603 1/2W; Manufacturer: Yageo; Manufacturer Part Number: PA0603-R-070RL; Supplier: Digikey; Supplier Part Number: YAG5757CT-ND; RoHS: Yes; Category: Chip SMD Resistors; Stock: 20723; Pricing: 1=0.41, 10=0.265, 25=0.2244, 50=0.199, 100=0.1774, 250=0.1536, 500=0.13874, 1000=0.12608 (USD); RoHS Compliant: Yes; ComponentLink1URL: https://datasheet.ciiva.com:443/pdfs/VipMasterIC/IC/YAGO/YAGO-S-A0007059204/YAGO-S-A0007059204-1.pdf?src-supplier=IHS+Markit; ComponentLink1Description: https://datasheet.ciiva.com:443/pdfs/VipMasterIC/IC/YAGO/YAGO-S-A0007059204/YAGO-S-A0007059204-1.pdf?src-supplier=IHS+Markit; ComponentLink2URL: http://www.yageo.com/NewPortal/_en/search/productDocs.jsp?YageoPartNumber=PA0603-R-070RL&src-supplier=Digikey; ComponentLink2Description: http://www.yageo.com/NewPortal/_en/search/productDocs.jsp?YageoPartNumber=PA0603-R-070RL&src-supplier=Digikey; ComponentLink3URL: https://www.yageo.com/upload/media/product/productsearch/datasheet/rchip/PYu-PA%20Jumper_L_51_RoHS_0.pdf?src-supplier=Digikey; ComponentLink3Description: https://www.yageo.com/upload/media/product/productsearch/datasheet/rchip/PYu-PA%20Jumper_L_51_RoHS_0.pdf?src-supplier=Digikey; ComponentLink4URL: https://datasheet.octopart.com/PA0603-R-070RL-Yageo-datasheet-170520406.pdf?src-supplier=Newark; ComponentLink4Description: https://datasheet.octopart.com/PA0603-R-070RL-Yageo-datasheet-170520406.pdf?src-supplier=Newark; ComponentLink5URL: https://datasheet.octopart.com/PA0603-R-070RL-Yageo-datasheet-170520406.pdf?src-supplier=Element14; ComponentLink5Description: https://datasheet.octopart.com/PA0603-R-070RL-Yageo-datasheet-170520406.pdf?src-supplier=Element14; Power: 1/2W; Value: 0R
footprint R0603_H0P45
pins: 1, 2

## R0R 0603_1
designator R?, comment value 0R  (hidden comment: 36-5110CT-ND)
0603 (1608Metric) Chip Resistor 0.061Lx0.033W 1.55mmx0.85mm 0.5W 1/2W 0Ohm Jumper; Manufacturer: Keystone; Manufacturer Part Number: 5110; Supplier: Digikey; Power: 1/2W; Supplier Part Number: 36-5110CT-ND; Category: Chip SMD Resistors; Stock: 98509; Pricing: 1=0.46, 10=0.349, 25=0.3128, 100=0.265, 500=0.21996 (USD); RoHS Compliant: Yes; ComponentLink1URL: http://www.mouser.com/ds/2/215/110-741577.pdf?src-supplier=Mouser; ComponentLink1Description: http://www.mouser.com/ds/2/215/110-741577.pdf?src-supplier=Mouser; ComponentLink2URL: http://keyelco.com/userAssets/file/M65p54.pdf?src-supplier=Digikey; ComponentLink2Description: http://keyelco.com/userAssets/file/M65p54.pdf?src-supplier=Digikey; ComponentLink3URL: http://www.keyelco.com/product-pdf.cfm?p=14038&src-supplier=Digikey; ComponentLink3Description: http://www.keyelco.com/product-pdf.cfm?p=14038&src-supplier=Digikey; ComponentLink4URL: http://datasheet.octopart.com/5110-Keystone-datasheet-130258701.pdf?src-supplier=Allied+Electronics; ComponentLink4Description: http://datasheet.octopart.com/5110-Keystone-datasheet-130258701.pdf?src-supplier=Allied+Electronics; ComponentLink5URL: https://datasheet.octopart.com/5110-Keystone-datasheet-137916593.pdf?src-supplier=Future+Electronics; ComponentLink5Description: https://datasheet.octopart.com/5110-Keystone-datasheet-137916593.pdf?src-supplier=Future+Electronics; ComponentLink6URL: http://datasheet.octopart.com/5110-Keystone-datasheet-130258701.pdf?src-supplier=Verical; ComponentLink6Description: http://datasheet.octopart.com/5110-Keystone-datasheet-130258701.pdf?src-supplier=Verical; ComponentLink7URL: http://datasheet.octopart.com/5110-Keystone-datasheet-130258701.pdf?src-supplier=LCSC; ComponentLink7Description: http://datasheet.octopart.com/5110-Keystone-datasheet-130258701.pdf?src-supplier=LCSC; ComponentLink8URL: http://datasheet.octopart.com/5110-Keystone-datasheet-130258701.pdf?src-supplier=Interstate+Connecting+Components; ComponentLink8Description: http://datasheet.octopart.com/5110-Keystone-datasheet-130258701.pdf?src-supplier=Interstate+Connecting+Components; ComponentLink9URL: https://datasheet.octopart.com/5110-Keystone-datasheet-130258701.pdf?src-supplier=Sager+Electronics; ComponentLink9Description: https://datasheet.octopart.com/5110-Keystone-datasheet-130258701.pdf?src-supplier=Sager+Electronics; ComponentLink10URL: https://datasheet.octopart.com/5110-Keystone-datasheet-34916011.pdf?src-supplier=Future+Electronics; ComponentLink10Description: https://datasheet.octopart.com/5110-Keystone-datasheet-34916011.pdf?src-supplier=Future+Electronics; Supplier 1: Digikey; Supplier Part Number 1: 36-5110CT-ND; Supplier 2: Digikey; Supplier Part Number 2: 36-5110DKR-ND
footprint R0603_H0P45
pins: 1, 2

## R1K13 1% 0402
designator R?, comment 1K13
Fixed Resistor, Metal Glaze/thick Film, 0.1W, 1130ohm, 50V, 1% +/-Tol, 100ppm/Cel, Surface Mount, 0402; Manufacturer: Panasonic; Manufacturer Part Number: ERJ-2RKF1131X; Power: 100mW; Temperature Coefficient (ppm/Cel): 100; Rated Temperature: 70°C; Package Height: 0.35mm; Package Length: 1mm; Package Width: 0.5mm; Reference Standard: AEC-Q200; Tolerance: 1%; Package: 0402; Type: Resistor; Supplier: Mouser; Supplier Part Number: 667-ERJ-2RKF1131X; RoHS: Yes; Category: Chip SMD Resistors; Stock: 3557; Pricing: 1=0.1, 10=0.026, 50=0.026, 100=0.013, 1000=0.008, 10000=0.003 (USD); Mounting Technology: Surface Mount; Pins: 2; Case/Package: 0402; Package Shape: Rectangular; Terminal Finish: Nickel; Min Operating Temperature: -55°C; Max Operating Temperature: 155°C; Resistor Type: FIXED RESISTOR; Construction: Rectangular; Packaging: Tape and Reel; Technology: METAL GLAZE/THICK FILM; Termination: Wraparound; Working Voltage: 50V; JESD-609 Code: e3; Reach SVHC Compliant: Yes; RoHS Compliant: Yes; ComponentLink1URL: https://datasheet.ciiva.com:443/pdfs/VipMasterIC/IC/PANA/PANA-S-A0009889626/PANA-S-A0009889626-1.pdf?src-supplier=IHS+Markit; ComponentLink1Description: https://datasheet.ciiva.com:443/pdfs/VipMasterIC/IC/PANA/PANA-S-A0009889626/PANA-S-A0009889626-1.pdf?src-supplier=IHS+Markit; ComponentLink2URL: https://datasheet.ciiva.com/28610/1694929-28610954.pdf?src-supplier=Element14; ComponentLink2Description: https://datasheet.ciiva.com/28610/1694929-28610954.pdf?src-supplier=Element14; ComponentLink3URL: https://datasheet.ciiva.com/46372/1678782-46372782.pdf?src-supplier=Element14; ComponentLink3Description: https://datasheet.ciiva.com/46372/1678782-46372782.pdf?src-supplier=Element14; ComponentLink4URL: https://datasheet.ciiva.com/46372/1678782-46372783.pdf?src-supplier=Element14; ComponentLink4Description: https://datasheet.ciiva.com/46372/1678782-46372783.pdf?src-supplier=Element14; ComponentLink5URL: https://datasheet.ciiva.com/24124/aoa0000ce2-24124446.pdf?src-supplier=Mouser; ComponentLink5Description: https://datasheet.ciiva.com/24124/aoa0000ce2-24124446.pdf?src-supplier=Mouser; ComponentLink6URL: https://datasheet.ciiva.com/30179/aoa0000ce2-30179662.pdf?src-supplier=Onlinecomponents.com; ComponentLink6Description: https://datasheet.ciiva.com/30179/aoa0000ce2-30179662.pdf?src-supplier=Onlinecomponents.com; ComponentLink7URL: https://datasheet.ciiva.com/15825/aoa0000ce2-15825575.pdf?src-supplier=Onlinecomponents.com; ComponentLink7Description: https://datasheet.ciiva.com/15825/aoa0000ce2-15825575.pdf?src-supplier=Onlinecomponents.com; ComponentLink8URL: https://datasheet.ciiva.com/22668/1678782-22668103.pdf?src-supplier=Element14; ComponentLink8Description: https://datasheet.ciiva.com/22668/1678782-22668103.pdf?src-supplier=Element14; ComponentLink9URL: https://datasheet.ciiva.com/16766/70260748-16766826.pdf?src-supplier=Allied+Electronics; ComponentLink9Description: https://datasheet.ciiva.com/16766/70260748-16766826.pdf?src-supplier=Allied+Electronics; ComponentLink10URL: https://datasheet.ciiva.com/16786/70260748-16786630.pdf?src-supplier=Allied+Electronics; ComponentLink10Description: https://datasheet.ciiva.com/16786/70260748-16786630.pdf?src-supplier=Allied+Electronics; Value: 1K13
footprint R0402_H0P4
pins: 1, 2

## R1K18 1% 0402
designator R?, comment 1K18
Fixed Resistor, Metal Glaze/thick Film, 0.1W, 1180ohm, 50V, 1% +/-Tol, 100ppm/Cel, Surface Mount, 0402; Manufacturer: Panasonic; Manufacturer Part Number: ERJ-2RKF1181X; Power: 100mW; Temperature Coefficient (ppm/Cel): 100; Rated Temperature: 70°C; Package Height: 0.35mm; Package Length: 1mm; Package Width: 0.5mm; Reference Standard: AEC-Q200; Tolerance: 1%; Package: 0402; Type: Resistor; ComponentLink1URL: https://datasheet.ciiva.com:443/pdfs/VipMasterIC/IC/VISH/VISH-S-A0007266705/VISH-S-A0007266705-1.pdf?src-supplier=IHS+Markit; ComponentLink1Description: https://datasheet.ciiva.com:443/pdfs/VipMasterIC/IC/VISH/VISH-S-A0007266705/VISH-S-A0007266705-1.pdf?src-supplier=IHS+Markit; ComponentLink2URL: https://datasheet.ciiva.com/11808/0900766b80d98824-11808638.pdf?src-supplier=Rs; ComponentLink2Description: https://datasheet.ciiva.com/11808/0900766b80d98824-11808638.pdf?src-supplier=Rs; ComponentLink3URL: https://datasheet.ciiva.com/2463/dcrcwe3-2463028.pdf?src-supplier=Digikey; ComponentLink3Description: https://datasheet.ciiva.com/2463/dcrcwe3-2463028.pdf?src-supplier=Digikey; ComponentLink4URL: https://datasheet.ciiva.com/2463/dcrcwe3-2463029.pdf?src-supplier=Digikey; ComponentLink4Description: https://datasheet.ciiva.com/2463/dcrcwe3-2463029.pdf?src-supplier=Digikey; ComponentLink5URL: https://datasheet.ciiva.com/2463/dcrcwe3-2463030.pdf?src-supplier=Digikey; ComponentLink5Description: https://datasheet.ciiva.com/2463/dcrcwe3-2463030.pdf?src-supplier=Digikey; ComponentLink6URL: https://datasheet.ciiva.com/3256/dcrcwe3-3256139.pdf?src-supplier=Avnet; ComponentLink6Description: https://datasheet.ciiva.com/3256/dcrcwe3-3256139.pdf?src-supplier=Avnet; ComponentLink7URL: https://datasheet.ciiva.com/26316/fld-crcw-e3-data-en-26316646.pdf?src-supplier=Distrelec; ComponentLink7Description: https://datasheet.ciiva.com/26316/fld-crcw-e3-data-en-26316646.pdf?src-supplier=Distrelec; Supplier: Digikey; Supplier Part Number: P1.18KLTR-ND; RoHS: Yes; Category: Chip SMD Resistors; Stock: 80000; Pricing: 10000=0.00331, 20000=0.00326, 30000=0.00324, 50000=0.00322, 70000=0.0032, 100000=0.00319, 250000=0.00315, 500000=0.00313, 1000000=0.00311 (USD); Mounting Technology: Surface Mount; Pins: 2; Case/Package: 0402; Package Shape: Rectangular; Terminal Finish: Nickel; Min Operating Temperature: -55°C; Max Operating Temperature: 155°C; Resistor Type: FIXED RESISTOR; Construction: Rectangular; Packaging: Tape and Reel; Technology: METAL GLAZE/THICK FILM; Termination: Wraparound; Working Voltage: 50V; JESD-609 Code: e3; Reach SVHC Compliant: Yes; RoHS Compliant: Yes; ComponentLink8URL: https://datasheet.ciiva.com:443/pdfs/VipMasterIC/IC/PANA/PANA-S-A0009889626/PANA-S-A0009889626-1.pdf?src-supplier=IHS+Markit; ComponentLink8Description: https://datasheet.ciiva.com:443/pdfs/VipMasterIC/IC/PANA/PANA-S-A0009889626/PANA-S-A0009889626-1.pdf?src-supplier=IHS+Markit; ComponentLink9URL: https://datasheet.ciiva.com/46372/1678782-46372778.pdf?src-supplier=Element14; ComponentLink9Description: https://datasheet.ciiva.com/46372/1678782-46372778.pdf?src-supplier=Element14; ComponentLink10URL: https://datasheet.ciiva.com/46372/1678782-46372779.pdf?src-supplier=Element14; ComponentLink10Description: https://datasheet.ciiva.com/46372/1678782-46372779.pdf?src-supplier=Element14; ComponentLink11URL: https://datasheet.ciiva.com/22668/1678782-22668106.pdf?src-supplier=Element14; ComponentLink11Description: https://datasheet.ciiva.com/22668/1678782-22668106.pdf?src-supplier=Element14; ComponentLink12URL: https://datasheet.ciiva.com/9198/aoa0000ce2-9198555.pdf?src-supplier=Avnet; ComponentLink12Description: https://datasheet.ciiva.com/9198/aoa0000ce2-9198555.pdf?src-supplier=Avnet; ComponentLink13URL: https://datasheet.ciiva.com/43467/1678782-43467318.pdf?src-supplier=Farnell; ComponentLink13Description: https://datasheet.ciiva.com/43467/1678782-43467318.pdf?src-supplier=Farnell; ComponentLink14URL: https://datasheet.ciiva.com/24025/aoa0000ce2-24025255.pdf?src-supplier=Mouser; ComponentLink14Description: https://datasheet.ciiva.com/24025/aoa0000ce2-24025255.pdf?src-supplier=Mouser; ComponentLink15URL: https://datasheet.ciiva.com/16758/70260748-16758040.pdf?src-supplier=Allied+Electronics; ComponentLink15Description: https://datasheet.ciiva.com/16758/70260748-16758040.pdf?src-supplier=Allied+Electronics; ComponentLink16URL: https://datasheet.ciiva.com/30144/aoa0000ce2-30144870.pdf?src-supplier=Onlinecomponents.com; ComponentLink16Description: https://datasheet.ciiva.com/30144/aoa0000ce2-30144870.pdf?src-supplier=Onlinecomponents.com; Value: 1K18
footprint R0402_H0P4
pins: 1, 2

## R1K 1% 0201
designator R?, comment value 1K  (hidden comment: RC0201FR-071KL)
Res Thick Film 0201 1K Ohm 1% 0.05W(1/20W) ±200ppm/C Pad SMD T/R; Manufacturer: Yageo Group; Max Power Dissipation: 50mW; Temperature Coefficient: 200ppm/°C; Voltage Rating: 25V; Supplier: DigiKey; Supplier Part Number: 311-1KMCT-ND; Manufacturer Part Number: RC0201FR-071KL; RoHS: Compliant; Category: Chip SMD Resistors; Stock: 106003; Pricing: 1=0.1, 10=0.006, 25=0.0056 (USD); Case/Package: 0201; Case Code (Imperial): 0201; Case Code (Metric): 0603; China RoHS: Non-Compliant; Composition: Thick Film; Contact Plating: Tin; Country of Origin: Mainland China, Taiwan; Depth: 300µm; Export Control Classification Number (ECCN) Code: EAR99; Features: Moisture Resistant; Height: 230µm; Harmonized Tariff Schedule (HTS) Code: 8533.21.00.30; Introduction Date: 2008-07-18; Lead Free: Lead Free; Length: 600µm; Lifecycle Status: Production; Max Operating Temperature: 125°C; Military Standard: Not; Min Operating Temperature: -55°C; Mounting Technology: Surface Mount; Number of Terminals: 2; Number of Terminations: 2; Packaging: Tape & Reel; Power Dissipation: 50mW; Power Rating: 50mW; Radiation Hardening: No; REACH SVHC: Yes; Schedule B: 8533210045, 8533210045|8533210045|8533210045|8533210045|8533210045|8533210045|8533210045|8533210045|8533210045|8533210045|8533210045|8533210045|8533210045|8533210045|8533210045|8533210045|8533210045|8533210045|8533210045|8533210045|8533210045|8533210045|8533210045|85; Termination: SMD/SMT; Tolerance: 1%; Voltage Rating (DC): 25V; Width: 300µm; Working Voltage: 25V; ComponentLink1URL: https://datasheet.octopart.com:443/RC0201FR-071KL-Yageo-datasheet-175887523.pdf?src-supplier=Newark; ComponentLink1Description: https://datasheet.octopart.com:443/RC0201FR-071KL-Yageo-datasheet-175887523.pdf?src-supplier=Newark; ComponentLink2URL: https://datasheet.octopart.com:443/RC0201FR-071KL-Yageo-datasheet-10025917.pdf?src-supplier=Newark; ComponentLink2Description: https://datasheet.octopart.com:443/RC0201FR-071KL-Yageo-datasheet-10025917.pdf?src-supplier=Newark; ComponentLink3URL: https://datasheet.octopart.com:443/RC0201FR-071KL-Yageo-datasheet-12509713.pdf?src-supplier=_legacy+Avnet; ComponentLink3Description: https://datasheet.octopart.com:443/RC0201FR-071KL-Yageo-datasheet-12509713.pdf?src-supplier=_legacy+Avnet; ComponentLink4URL: https://datasheet.octopart.com:443/RC0201FR-071KL-Yageo-datasheet-13314888.pdf?src-supplier=Upverter; ComponentLink4Description: https://datasheet.octopart.com:443/RC0201FR-071KL-Yageo-datasheet-13314888.pdf?src-supplier=Upverter; ComponentLink5URL: https://datasheet.octopart.com:443/RC0201FR-071KL-Yageo-datasheet-12549147.pdf?src-supplier=Upverter; ComponentLink5Description: https://datasheet.octopart.com:443/RC0201FR-071KL-Yageo-datasheet-12549147.pdf?src-supplier=Upverter; ComponentLink6URL: https://datasheet.octopart.com:443/RC0201FR-071KL-Yageo-datasheet-12509741.pdf?src-supplier=Upverter; ComponentLink6Description: https://datasheet.octopart.com:443/RC0201FR-071KL-Yageo-datasheet-12509741.pdf?src-supplier=Upverter; ComponentLink7URL: https://datasheet.octopart.com:443/RC0201FR-071KL-Yageo-datasheet-62067350.pdf?src-supplier=element14+APAC; ComponentLink7Description: https://datasheet.octopart.com:443/RC0201FR-071KL-Yageo-datasheet-62067350.pdf?src-supplier=element14+APAC; ComponentLink8URL: https://datasheet.octopart.com:443/RC0201FR-071KL-Yageo-datasheet-10911895.pdf?src-supplier=element14+APAC; ComponentLink8Description: https://datasheet.octopart.com:443/RC0201FR-071KL-Yageo-datasheet-10911895.pdf?src-supplier=element14+APAC; ComponentLink9URL: https://datasheet.octopart.com:443/RC0201FR-071KL-Yageo-Group-datasheet-176638170.pdf?src-supplier=Future+Electronics; ComponentLink9Description: https://datasheet.octopart.com:443/RC0201FR-071KL-Yageo-Group-datasheet-176638170.pdf?src-supplier=Future+Electronics; ComponentLink10URL: https://datasheet.octopart.com:443/RC0201FR-071KL-Yageo-datasheet-164759695.pdf?src-supplier=Future+Electronics; ComponentLink10Description: https://datasheet.octopart.com:443/RC0201FR-071KL-Yageo-datasheet-164759695.pdf?src-supplier=Future+Electronics; ComponentLink11URL: https://datasheet.octopart.com:443/RC0201FR-071KL-Yageo-datasheet-127823281.pdf?src-supplier=Future+Electronics; ComponentLink11Description: https://datasheet.octopart.com:443/RC0201FR-071KL-Yageo-datasheet-127823281.pdf?src-supplier=Future+Electronics; ComponentLink12URL: https://datasheet.octopart.com:443/RC0201FR-071KL-Yageo-datasheet-137700087.pdf?src-supplier=Future+Electronics; ComponentLink12Description: https://datasheet.octopart.com:443/RC0201FR-071KL-Yageo-datasheet-137700087.pdf?src-supplier=Future+Electronics; ComponentLink13URL: https://datasheet.octopart.com:443/RC0201FR-071KL-Yageo-datasheet-103092701.pdf?src-supplier=Future+Electronics; ComponentLink13Description: https://datasheet.octopart.com:443/RC0201FR-071KL-Yageo-datasheet-103092701.pdf?src-supplier=Future+Electronics; ComponentLink14URL: https://datasheet.octopart.com:443/RC0201FR-071KL-Yageo-datasheet-98239111.pdf?src-supplier=Future+Electronics; ComponentLink14Description: https://datasheet.octopart.com:443/RC0201FR-071KL-Yageo-datasheet-98239111.pdf?src-supplier=Future+Electronics; ComponentLink15URL: https://datasheet.octopart.com:443/RC0201FR-071KL-Yageo-datasheet-44382975.pdf?src-supplier=Future+Electronics; ComponentLink15Description: https://datasheet.octopart.com:443/RC0201FR-071KL-Yageo-datasheet-44382975.pdf?src-supplier=Future+Electronics; ComponentLink16URL: https://datasheet.octopart.com:443/RC0201FR-071KL-Yageo-datasheet-41589693.pdf?src-supplier=Future+Electronics; ComponentLink16Description: https://datasheet.octopart.com:443/RC0201FR-071KL-Yageo-datasheet-41589693.pdf?src-supplier=Future+Electronics; ComponentLink17URL: https://datasheet.octopart.com:443/RC0201FR-071KL-Yageo-datasheet-37140709.pdf?src-supplier=Future+Electronics; ComponentLink17Description: https://datasheet.octopart.com:443/RC0201FR-071KL-Yageo-datasheet-37140709.pdf?src-supplier=Future+Electronics; ComponentLink18URL: https://datasheet.octopart.com:443/RC0201FR-071KL-Yageo-datasheet-12509768.pdf?src-supplier=Future+Electronics; ComponentLink18Description: https://datasheet.octopart.com:443/RC0201FR-071KL-Yageo-datasheet-12509768.pdf?src-supplier=Future+Electronics; ComponentLink19URL: https://datasheet.octopart.com:443/RC0201FR-071KL-Yageo-datasheet-12590898.pdf?src-supplier=Future+Electronics; ComponentLink19Description: https://datasheet.octopart.com:443/RC0201FR-071KL-Yageo-datasheet-12590898.pdf?src-supplier=Future+Electronics; ComponentLink20URL: https://datasheet.octopart.com:443/RC0201FR-071KL-Yageo-datasheet-12535854.pdf?src-supplier=Future+Electronics; ComponentLink20Description: https://datasheet.octopart.com:443/RC0201FR-071KL-Yageo-datasheet-12535854.pdf?src-supplier=Future+Electronics; ComponentLink21URL: https://datasheet.octopart.com:443/RC0201FR-071KL-Yageo-datasheet-148775077.pdf?src-supplier=TME; ComponentLink21Description: https://datasheet.octopart.com:443/RC0201FR-071KL-Yageo-datasheet-148775077.pdf?src-supplier=TME; ComponentLink22URL: https://datasheet.octopart.com:443/RC0201FR-071KL-Yageo-datasheet-79472498.pdf?src-supplier=Megastar; ComponentLink22Description: https://datasheet.octopart.com:443/RC0201FR-071KL-Yageo-datasheet-79472498.pdf?src-supplier=Megastar; ComponentLink23URL: https://datasheet.octopart.com/RC0201FR-071KL-Yageo-datasheet-73766026.pdf; ComponentLink23Description: https://datasheet.octopart.com/RC0201FR-071KL-Yageo-datasheet-73766026.pdf; ComponentLink24URL: http://sigma.octopart.com:80/conflict_mineral_statement/Yageo-company-3.pdf?src-supplier=Compliance+Statements; ComponentLink24Description: http://sigma.octopart.com:80/conflict_mineral_statement/Yageo-company-3.pdf?src-supplier=Compliance+Statements; ComponentLink25URL: http://sigma.octopart.com:80/rohs_statement/Yageo-company-2.pdf?src-supplier=Compliance+Statements; ComponentLink25Description: http://sigma.octopart.com:80/rohs_statement/Yageo-company-2.pdf?src-supplier=Compliance+Statements; Supplier 1: DigiKey; Supplier Part Number 1: 311-1KMCT-ND; Supplier 2: DigiKey; Supplier Part Number 2: 311-1KMTR-ND; Supplier 3: Mouser; Supplier Part Number 3: 603-RC0201FR-071KL
footprint RESC0603X03N (Chip Resistor, 2-Leads, Body 0.60x0.30mm, IPC Medium Density)
pins: 1, 2